# Altium footprint library Footprint-Lib-PhilsLab.PcbLib: 352 footprints (part 2 of 22)
Each footprint in its own frame and in the unit in brackets; x right, y up, seen from the top. Pads: shape width x height; smd on the part's side, far side on the other; paste and mask are expansions set on the pad; w line width, h text height; cw(c..) or ccw(c..) is an arc to the next point about the centre after c.
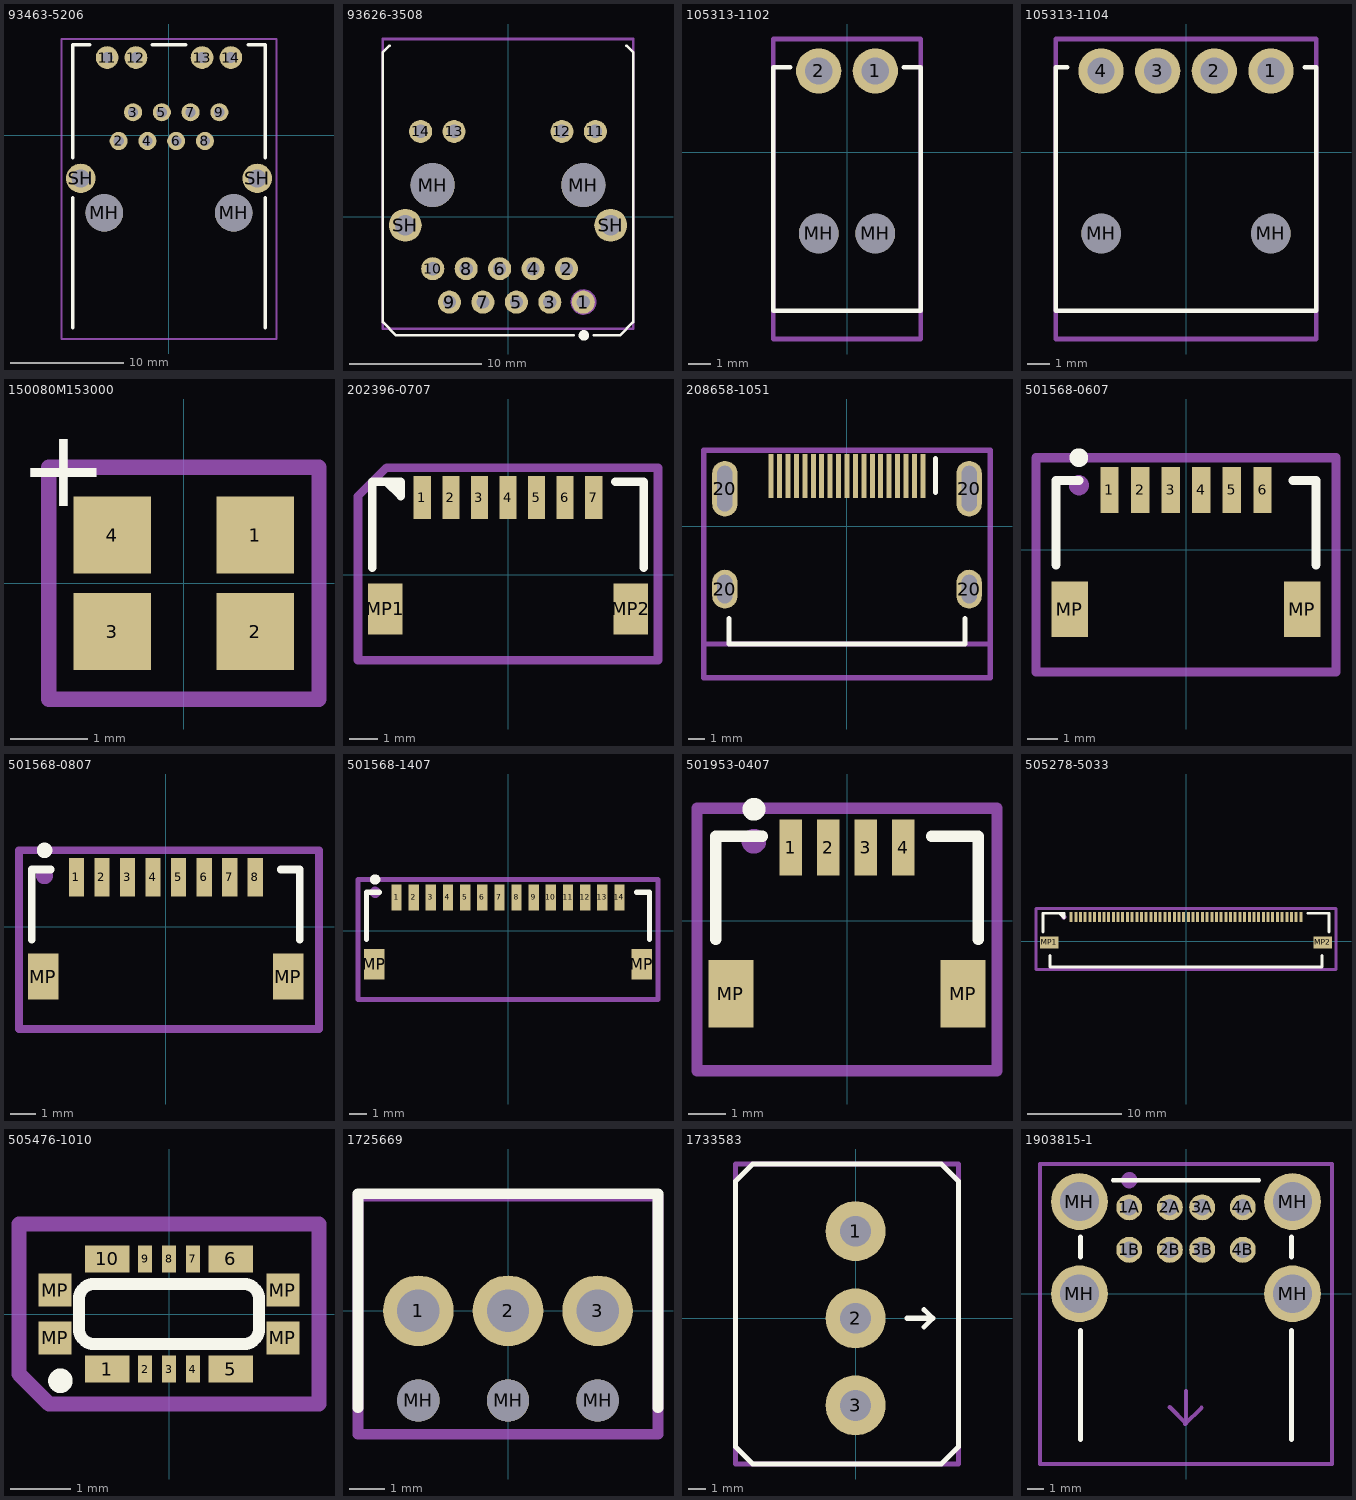
[diagram p1: the footprints below, top view; thin cyan lines are the x and y axes]

## 93463-5206 [mm]
pads (16):
  round 1.6 hole 0.9: 2(-4.445,-0.51) 3(-3.175,2.03) 4(-1.905,-0.51) 5(-0.635,2.03) 6(0.635,-0.51) 7(1.905,2.03) 8(3.175,-0.51) 9(4.445,2.03)
  round 2 hole 1: 11(-5.46,6.86) 12(-2.92,6.86) 13(2.92,6.86) 14(5.46,6.86)
  round 3.3 hole 3.3 unplated: MH(-5.715,-6.86) MH(5.715,-6.86)
  round 2.6 hole 1.6: SH(-7.795,-3.81) SH(7.795,-3.81)
Top Overlay:
  lines w0.3: -8.5,-17 -8.5,-5.5 ; -8.5,-2 -8.5,8 -7,8 ; -1.5,8 1.5,8 ; 7,8 8.5,8 8.5,-2 ; 8.5,-17 8.5,-5.5
Mechanical 13:
  lines w0.2: -9.5,-18 -8,-18 9.5,-18 9.5,8.5 -9.5,8.5 -9.5,-18
  text ".Designator" at -4.998,-0.333 h1
3D body "93463-5206.stp": height 14.11, standoff -3.29, extent -8.12,-17.687 8.12,7.713

## 93626-3508 [mm]
pads (18):
  round 1.75 hole 1: 1(5.715,-6.48) 2(4.445,-3.94) 3(3.175,-6.48) 4(1.905,-3.94) 5(0.635,-6.48) 6(-0.635,-3.94) 7(-1.905,-6.48) 8(-3.175,-3.94) 9(-4.445,-6.48) 10(-5.715,-3.94)
  round 1.75 hole 1.02: 11(6.635,6.48) 12(4.095,6.48) 13(-4.095,6.48) 14(-6.635,6.48)
  round 3.34 hole 3.34 unplated: MH(-5.715,2.41) MH(5.715,2.41)
  round 2.5 hole 1.58: SH(-7.795,-0.64) SH(7.795,-0.64)
Top Overlay:
  circle w0.25: c5.764,-9.001 r0.113
  circle w0.25: c5.764,-9.001 r0.277
  lines w0.2: -9,13 -9.5,12.5 -9.5,-8 -8.5,-9 5,-9 ; 6.5,-9 8.5,-9 9.5,-8 9.5,12.5 9,13
Mechanical 13:
  circle w0.25: c5.735,-6.476 r0.854
  lines w0.2: -9.5,-8.5 9.5,-8.5 9.5,13.5 -9.5,13.5 -9.5,-2 -9.5,-8.5
  text "'.Designator'" at -5.84,-0.925 h1
3D body "93626-3508.stp": height 15.21, standoff -3.29, extent -9.069,-8.14 9.089,13.23

## 105313-1102 [mm]
pads (4):
  round 2 hole 1.2: 1(1.25,3.59) 2(-1.25,3.59)
  round 1.75 hole 1.75 unplated: MH(-1.25,-3.59) MH(1.25,-3.59)
Top Overlay:
  lines w0.2: -2.5,3.75 -3.25,3.75 -3.25,-7 3.25,-7 3.25,3.75 2.5,3.75
Mechanical 13:
  lines w0.2: -3.25,-8.25 3.25,-8.25 3.25,5 -3.25,5 -3.25,-8.25
  text "'.Designator'" at -5.665,-0.417 h1
3D body "105313-1102.stp": height 6.65, standoff -3.19, extent -2.97,-8.25 2.97,3.908

## 105313-1104 [mm]
pads (6):
  round 2 hole 1.2: 1(3.75,3.59) 2(1.25,3.59) 3(-1.25,3.59) 4(-3.75,3.59)
  round 1.75 hole 1.75 unplated: MH(-3.75,-3.59) MH(3.75,-3.59)
Top Overlay:
  lines w0.2: -5.25,3.75 -5.75,3.75 -5.75,-7 5.75,-7 5.75,3.75 5.25,3.75
Mechanical 13:
  lines w0.2: -5.75,-8.25 5.75,-8.25 5.75,5 -5.75,5 -5.75,-8.25
  text "'.Designator'" at -5.665,-0.417 h1
3D body "105313-1104.stp": height 6.65, standoff -3.19, extent -5.47,-8.25 5.47,3.908

## 150080M153000 [mm]
pads (4):
  rect 1x1 smd mask+0.15: 1(0.925,0.625) 2(0.925,-0.625) 3(-0.925,-0.625) 4(-0.925,0.625)
Top Overlay:
  text "+" at -2.133,1 h1
Mechanical 13:
  lines w0.2: -1.75,-1.5 -1.75,1.5 1.75,1.5 1.75,-1.5 -1.75,-1.5
  text "+" at -2.583,1.5 h1
  text "'.Designator'" at -5.665,-0.417 h1
3D body "150080M153000.stp": height 0.51, standoff 0.01, extent -1,-0.65 1,0.65

## 202396-0707 [mm]
pads (9):
  rect 0.6x1.5 smd: 1(-3,2.7) 2(-2,2.7) 3(-1,2.7) 4(0,2.7) 5(1,2.7) 6(2,2.7) 7(3,2.7)
  rect 1.2x1.8 smd: MP1(-4.3,-1.2) MP2(4.3,-1.2)
Top Overlay:
  lines w0.3: -4.75,0.25 -4.75,3.25 -3.75,3.25 -3.75,2.75 ; -4.25,3.25 -3.75,2.75 ; 3.75,3.25 4.75,3.25 4.75,0.25 ; -3.75,2.75 -3.75,2.75 ; -3.75,2.75 -3.75,2.75
Mechanical 13:
  lines w0.3: -5.25,-3 -5.25,2.75 -4.25,3.75 5.25,3.75 5.25,-3 -5.25,-3
  text "'.Designator'" at -5.84,-0.925 h1
3D body "202396-0707.stp": height 4.71, standoff 0.01, extent -4.5,-2.725 4.5,3.175

## 208658-1051 [mm]
pads (23):
  rect 0.3x2.6 smd mask+0.07: 1(4.5,2.98) 2(4,2.98) 3(3.5,2.98) 4(3,2.98) 5(2.5,2.98) 6(2,2.98) 7(1.5,2.98) 8(1,2.98) 9(0.5,2.98) 10(0,2.98) 11(-0.5,2.98) 12(-1,2.98) 13(-1.5,2.98) 14(-2,2.98) 15(-2.5,2.98) 16(-3,2.98) 17(-3.5,2.98) 18(-4,2.98) 19(-4.5,2.98)
  oval 1.5x2.3 hole 0.9 slot 1.7 at 90 deg mask+0.07: 20(-7.25,-3.74) 20(7.25,-3.74)
  oval 1.5x3.3 hole 0.9 slot 2.7 at 90 deg mask+0.07: 20(-7.25,2.22) 20(7.25,2.22)
Top Overlay:
  lines w0.3: -7,-5.5 -7,-7 7,-7 7,-5.5 ; 5.25,2 5.25,4
Mechanical 13:
  lines w0.3: -8.5,-7 8.5,-7 ; -8.5,-9 -8.5,-4.5 -8.5,4.5 8.5,4.5 8.5,-9 -8.5,-9
  text "'.Designator'" at -5.84,-0.925 h1
3D body "208658-1051.stp": height 6.19, standoff -2.61, extent -7.497,-8.548 7.506,3.887

## 501568-0607 [mm]
pads (8):
  rect 0.6x1.5 smd: 1(-2.5,1.95) 2(-1.5,1.95) 3(-0.5,1.95) 4(0.5,1.95) 5(1.5,1.95) 6(2.5,1.95)
  rect 1.2x1.8 smd: MP(-3.8,-1.95) MP(3.8,-1.95)
Top Overlay:
  circle w0.5: c-3.5,3 r0.054
  lines w0.3: -4.25,-0.5 -4.25,2.25 -3.5,2.25 ; 3.5,2.25 4.25,2.25 4.25,-0.5
Mechanical 13:
  circle w0.5: c-3.5,2.1 r0.078
  lines w0.3: -4.9,-4 -4.9,3 4.9,3 4.9,-4 -4.9,-4
  text "'.Designator'" at -5.815,-0.9 h1
3D body "501568-0607.stp": height 4.71, standoff 0.01, extent -4,-3.5 4,2.4

## 501568-0807 [mm]
pads (10):
  rect 0.6x1.5 smd: 1(-3.5,1.95) 2(-2.5,1.95) 3(-1.5,1.95) 4(-0.5,1.95) 5(0.5,1.95) 6(1.5,1.95) 7(2.5,1.95) 8(3.5,1.95)
  rect 1.2x1.8 smd: MP(-4.8,-1.95) MP(4.8,-1.95)
Top Overlay:
  circle w0.5: c-4.75,3 r0.054
  lines w0.3: -5.25,-0.5 -5.25,2.25 -4.5,2.25 ; 4.5,2.25 5.25,2.25 5.25,-0.5
Mechanical 13:
  circle w0.5: c-4.75,2 r0.078
  lines w0.3: -5.75,-4 6,-4 6,3 -5.75,3 -5.75,-4
  text "'.Designator'" at -5.815,-0.9 h1
3D body "501568-0807.stp": height 4.71, standoff 0.01, extent -5,-3.5 5,2.4

## 501568-1407 [mm]
pads (16):
  rect 0.6x1.5 smd: 1(-6.5,1.95) 2(-5.5,1.95) 3(-4.5,1.95) 4(-3.5,1.95) 5(-2.5,1.95) 6(-1.5,1.95) 7(-0.5,1.95) 8(0.5,1.95) 9(1.5,1.95) 10(2.5,1.95) 11(3.5,1.95) 12(4.5,1.95) 13(5.5,1.95) 14(6.5,1.95)
  rect 1.2x1.8 smd: MP(-7.8,-1.95) MP(7.8,-1.95)
Top Overlay:
  circle w0.5: c-7.75,3 r0.054
  lines w0.3: -8.25,-0.5 -8.25,2.25 -7.5,2.25 ; 7.5,2.25 8.25,2.25 8.25,-0.5
Mechanical 13:
  circle w0.5: c-7.75,2.25 r0.078
  lines w0.3: -8.75,-4 8.75,-4 8.75,3 -8.75,3 -8.75,-4
  text "'.Designator'" at -5.815,-0.9 h1
3D body "501568-1407.stp": height 4.71, standoff 0.01, extent -8,-3.5 8,2.4

## 501953-0407 [mm]
pads (6):
  rect 0.6x1.5 smd: 1(-1.5,1.95) 2(-0.5,1.95) 3(0.5,1.95) 4(1.5,1.95)
  rect 1.2x1.8 smd: MP(-3.1,-1.95) MP(3.1,-1.95)
Top Overlay:
  circle w0.5: c-2.481,2.971 r0.054
  lines w0.3: -3.5,-0.5 -3.5,2.25 -2.25,2.25 ; 2.25,2.25 3.5,2.25 3.5,-0.5
Mechanical 13:
  circle w0.5: c-2.483,2.118 r0.078
  lines w0.3: -4,-4 -4,3 4,3 4,-4 -4,-4
  text "'.Designator'" at -5.815,-0.9 h1
3D body "501953-0407.stp": height 4.71, standoff 0.01, extent -3,-3.55 3,2.35

## 505278-5033 [mm]
pads (52):
  rect 0.325x1.05 smd mask+0.05: 1(-12.25,2.613) 2(-11.75,2.613) 3(-11.25,2.613) 4(-10.75,2.613) 5(-10.25,2.613) 6(-9.75,2.613) 7(-9.25,2.613) 8(-8.75,2.613) 9(-8.25,2.613) 10(-7.75,2.613) 11(-7.25,2.613) 12(-6.75,2.613) 13(-6.25,2.613) 14(-5.75,2.613) 15(-5.25,2.613) 16(-4.75,2.613) 17(-4.25,2.613) 18(-3.75,2.613) 19(-3.25,2.613) 20(-2.75,2.613) 21(-2.25,2.613) 22(-1.75,2.613) 23(-1.25,2.613) 24(-0.75,2.613) 25(-0.25,2.613) 26(0.25,2.613) 27(0.75,2.613) 28(1.25,2.613) 29(1.75,2.613) 30(2.25,2.613) 31(2.75,2.613) 32(3.25,2.613) 33(3.75,2.613) 34(4.25,2.613) 35(4.75,2.613) 36(5.25,2.613) 37(5.75,2.613) 38(6.25,2.613) 39(6.75,2.613) 40(7.25,2.613) 41(7.75,2.613) 42(8.25,2.613) 43(8.75,2.613) 44(9.25,2.613) 45(9.75,2.613) 46(10.25,2.613) 47(10.75,2.613) 48(11.25,2.613) 49(11.75,2.613) 50(12.25,2.613)
  rect 2x1.3 smd mask+0.07: MP1(-14.575,-0.112) MP2(14.575,-0.112)
Top Overlay:
  lines w0.3: -15.25,1 -15.25,3 -13,3 -13,2.5 -13.5,3 ; -14.5,-1.5 -14.5,-2.75 14.5,-2.75 14.5,-1.5 ; 13,3 15.25,3 15.25,1
Mechanical 13:
  circle w0.254: c-13.025,2.596 r0.127
  lines w0.3: -16,-3 -16,3.5 16,3.5 16,-3 -16,-3
  text "'.Designator'" at -5.84,-0.925 h1
3D body "505278-5033.stp": height 1.91, standoff 0.01, extent -15.25,-2.513 15.25,2.787

## 505476-1010 [mm]
pads (14):
  rect 0.74x0.45 smd: 1(-1.03,-0.92) 5(1.03,-0.92) 6(1.03,0.92) 10(-1.03,0.92)
  rect 0.24x0.45 smd: 2(-0.4,-0.92) 3(0,-0.92) 4(0.4,-0.92) 7(0.4,0.92) 8(0,0.92) 9(-0.4,0.92)
  rect 0.55x0.55 smd mask+0.15: MP(-1.9,-0.4) MP(-1.9,0.4) MP(1.9,-0.4) MP(1.9,0.4)
Top Overlay:
  circle w0.254: c-1.81,-1.113 r0.077
  lines w0.2: -1.5,-0.25 ccw(c-1.25,-0.25) -1.25,-0.5 1.25,-0.5 ccw(c1.25,-0.25) 1.5,-0.25 1.5,0.25 ccw(c1.25,0.25) 1.25,0.5 -1,0.5 -1.125,0.5 -1.25,0.5 ccw(c-1.25,0.25) -1.5,0.25 -1.5,-0.25
Mechanical 13:
  lines w0.25: -2.5,-1 -2.5,1.5 2.5,1.5 2.5,-1.5 -2,-1.5 -2.5,-1
  text "'.Designator'" at -5.815,-0.9 h1
3D body "5054761010.stp": height 0.51, standoff 0.01, extent -2.07,-1 2.07,1

## 1725669 [mm]
pads (6):
  round 2 hole 1.2: 1(-2.54,0) 2(0,0) 3(2.54,0)
  round 1.2 hole 1.2 unplated: MH(-2.54,-2.54) MH(0,-2.54) MH(2.54,-2.54)
Top Overlay:
  lines w0.3: -4.25,-2.75 -4.25,3.32 4.25,3.32 4.25,-2.75
Mechanical 13:
  lines w0.3: -4.25,-3.5 4.25,-3.5 4.25,3.25 -4.25,3.25 -4.25,-3.5
  text "'.Designator'" at -5.665,-0.417 h1
3D body "1725669.stp": height 8.51, standoff -3.49, extent -4.03,-3.1 4.05,3.1

## 1733583 [mm]
pads (3):
  round 3.5 hole 1.8: 1(0,5.08) 2(0,0) 3(0,-5.08)
Top Overlay:
  lines w0.3: 3,0 4.5,0 ; 4,-0.5 4.5,0 ; 4,0.5 4.5,0 ; -7,-7.5 -6,-8.5 5,-8.5 6,-7.5 6,8 5,9 -6,9 -7,8 -7,-7.5
Mechanical 13:
  lines w0.3: -7,-8.5 -7,9 6,9 6,-8.5 -7,-8.5
  text "'.Designator'" at -6.315,-1.4 h1
3D body "1733583.stp": height 15.31, standoff -3.49, extent -6.398,-7.6 7.002,8.381

## 1903815-1 [mm]
pads (12):
  round 1.6 hole 1: 1A(-3.5,5.33) 1B(-3.5,2.71) 2A(-1,5.33) 2B(-1,2.71) 3A(1,5.33) 3B(1,2.71) 4A(3.5,5.33) 4B(3.5,2.71)
  round 3.5 hole 2.4: MH(-6.57,0) MH(-6.57,5.68) MH(6.57,0) MH(6.57,5.68)
Top Overlay:
  lines w0.254: -4.5,7 4.5,7
  lines w0.3: -6.5,-9 -6.5,-2.25 ; -6.5,2.25 -6.5,3.5 ; 6.5,-9 6.5,-2.25 ; 6.5,2.25 6.5,3.5
Mechanical 13:
  circle w0.5: c-3.5,7 r0.25
  lines w0.254: -1,-7 0,-8 ; -0.051,-8.034 0.949,-7.034 ; 0,-6 0,-8 ; 0,-8 0,-8 ; -9,-10.5 9,-10.5 9,8 -9,8 -9,-3.5 -9,-10.5
  text "'.Designator'" at -5.665,-0.417 h1
3D body "1903815-1.stp": height 16.21, standoff -3.71, extent -7.799,-10.3 7.799,6.66